# Altium footprint library OFS-CUSTOM.PcbLib: 2 footprints
Each footprint in its own frame and in the unit in brackets; x right, y up, seen from the top. Pads: shape width x height; smd on the part's side, far side on the other; paste and mask are expansions set on the pad; w line width, h text height; cw(c..) or ccw(c..) is an arc to the next point about the centre after c.
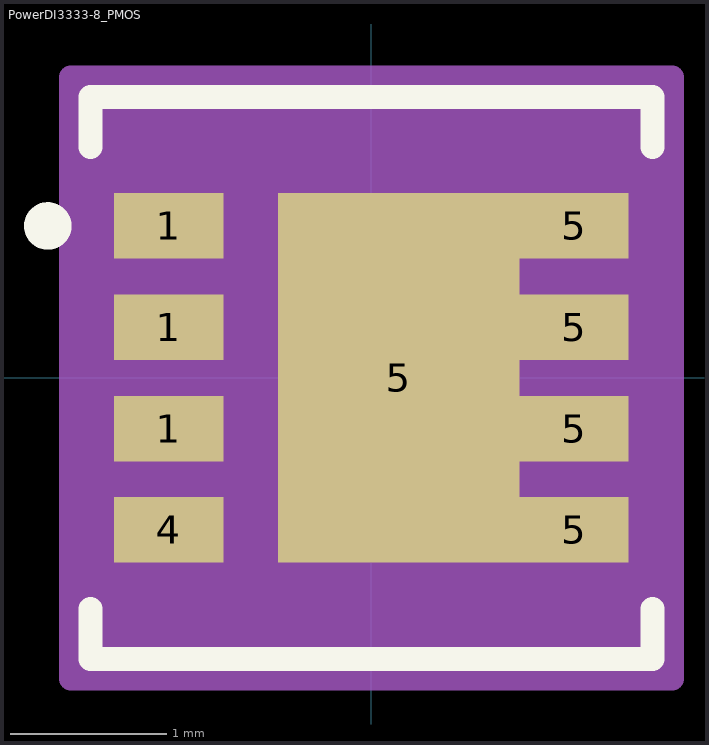
[diagram p0: the footprints below, top view; thin cyan lines are the x and y axes]

## PCBComponent_1 [mm]

## PowerDI3333-8_PMOS [mm]
pads (9):
  rect 0.7x0.42 smd paste+0 mask+0: 1(-1.3,-0.325) 1(-1.3,0.325) 1(-1.3,0.975) 4(-1.3,-0.975) 5(1.3,-0.975) 5(1.3,-0.325) 5(1.3,0.325) 5(1.3,0.975)
  rect 1.549x2.37 smd paste-0.127 mask+0: 5(0.175,0)
Top Overlay:
  circle w0.152: c-2.077,0.975 r0.076
  lines w0.152: -1.802,-1.481 -1.802,-1.802 1.802,-1.802 1.802,-1.481 ; -1.802,1.481 -1.802,1.802 1.802,1.802 1.802,1.481
  text ".Designator" at -3.492,-0.635 h1.27
Mechanical 13:
  lines w0.025: -0.305,1.675 ccw(c0,1.675) 0.305,1.675 ; -1.675,-1.675 -1.675,1.675 1.675,1.675 1.675,-1.675 -1.675,-1.675
  text ".Designator" at -3.492,-0.635 h1.27
Mechanical 15:
  region: -1.929,-1.439 -1.929,1.439 -1.929,1.929 1.929,1.929 1.929,1.439 1.929,-1.439 1.929,-1.929 -1.929,-1.929
  lines w0.152: -1.929,-1.929 1.929,-1.929 1.929,-1.439 1.929,1.439 1.929,1.929 -1.929,1.929 -1.929,1.439 -1.929,-1.439 -1.929,-1.929